# Altium integrated library PCB_Project.IntLib: 146 symbols (part 2 of 2)
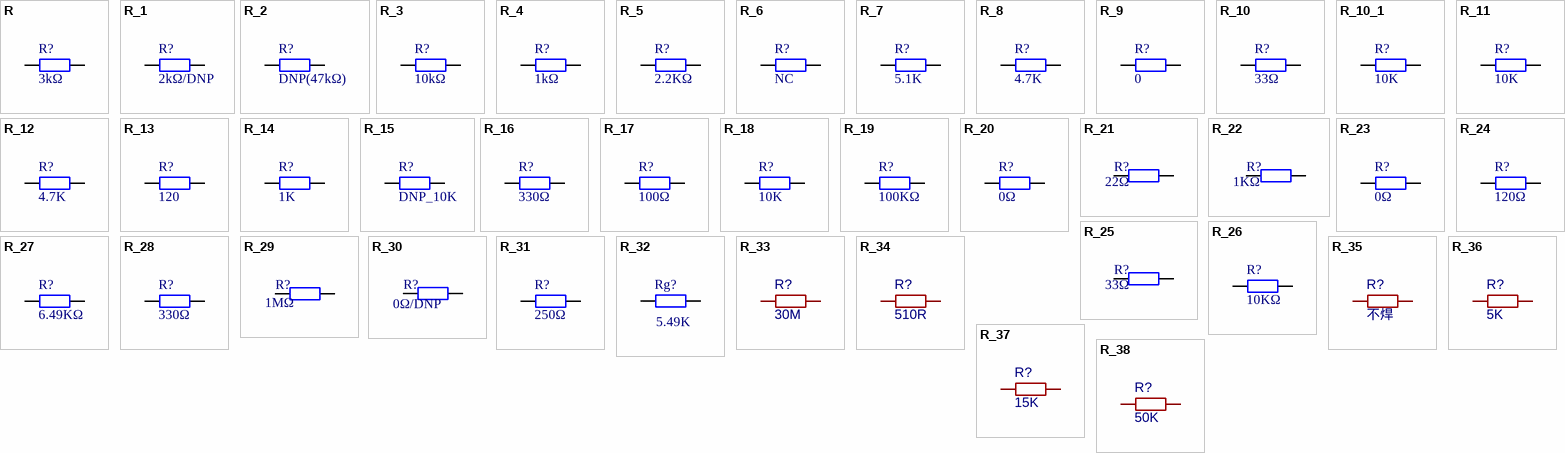
[diagram p4: symbols R to R_38]

## R_34
designator R?, comment 510R
贴片电阻; Device: R; 版权归属: 来自淘宝 ID：黄晶宝石; 封装库来自淘宝卖家 ID：黄晶宝石: 其他店铺购入均为盗版，不享受售后技术支持服务，请立即申请退款; Origin Footprint: R 0201_L; OriginFootprint 2: R 0402_L; OriginFootprint 3: R 0805_L; OriginFootprint 4: R 1206_L; OriginFootprint 5: R 1210_L; OriginFootprint 6: R 1812_L; OriginFootprint 7: R 2010_L; OriginFootprint 8: R 2512_L; OriginFootprint 9: R 0201_M; OriginFootprint 10: R 0402_M; OriginFootprint 11: R 0603_M; OriginFootprint 12: R 0805_M; OriginFootprint 13: R 1206_M; OriginFootprint 14: R 1210_M; OriginFootprint 15: R 1812_M; OriginFootprint 16: R 2010_M; OriginFootprint 17: R 2512_M; UniqueId: 7c41b6516f1c60a6; AddInBom: yes; OriginModelName: R 0603; BOM名称: 贴片电阻; 联系售后: https://shop463601444.taobao.com; DesignItemID: R; LibraryName: 0.1 - 电阻-电容-电感; SymbolName: R; FootprintName: R 0603_L
footprint 0603R
pins: 1, 2

## R_35
designator R?, comment 不焊
贴片电阻; Device: R; 版权归属: 来自淘宝 ID：黄晶宝石; 封装库来自淘宝卖家 ID：黄晶宝石: 其他店铺购入均为盗版，不享受售后技术支持服务，请立即申请退款; Origin Footprint: R 0201_L; OriginFootprint 2: R 0402_L; OriginFootprint 3: R 0805_L; OriginFootprint 4: R 1206_L; OriginFootprint 5: R 1210_L; OriginFootprint 6: R 1812_L; OriginFootprint 7: R 2010_L; OriginFootprint 8: R 2512_L; OriginFootprint 9: R 0201_M; OriginFootprint 10: R 0402_M; OriginFootprint 11: R 0603_M; OriginFootprint 12: R 0805_M; OriginFootprint 13: R 1206_M; OriginFootprint 14: R 1210_M; OriginFootprint 15: R 1812_M; OriginFootprint 16: R 2010_M; OriginFootprint 17: R 2512_M; UniqueId: 4df6a426e202bc68; AddInBom: yes; OriginModelName: R 0603; BOM名称: 贴片电阻; 联系售后: https://shop463601444.taobao.com; DesignItemID: R; LibraryName: 0.1 - 电阻-电容-电感; SymbolName: R; FootprintName: R 0603_L
footprint 0603R
pins: 1, 2

## R_36
designator R?, comment 5K
贴片电阻; Device: R; 版权归属: 来自淘宝 ID：黄晶宝石; 封装库来自淘宝卖家 ID：黄晶宝石: 其他店铺购入均为盗版，不享受售后技术支持服务，请立即申请退款; Origin Footprint: R 0201_L; OriginFootprint 2: R 0402_L; OriginFootprint 3: R 0805_L; OriginFootprint 4: R 1206_L; OriginFootprint 5: R 1210_L; OriginFootprint 6: R 1812_L; OriginFootprint 7: R 2010_L; OriginFootprint 8: R 2512_L; OriginFootprint 9: R 0201_M; OriginFootprint 10: R 0402_M; OriginFootprint 11: R 0603_M; OriginFootprint 12: R 0805_M; OriginFootprint 13: R 1206_M; OriginFootprint 14: R 1210_M; OriginFootprint 15: R 1812_M; OriginFootprint 16: R 2010_M; OriginFootprint 17: R 2512_M; UniqueId: df29ef2d077fcbbf; AddInBom: yes; OriginModelName: R 0603; BOM名称: 贴片电阻; 联系售后: https://shop463601444.taobao.com; DesignItemID: R; LibraryName: 0.1 - 电阻-电容-电感; SymbolName: R; FootprintName: R 0603_L
footprint 0603R
pins: 1, 2

## R_37
designator R?, comment 15K
贴片电阻; Device: R; 版权归属: 来自淘宝 ID：黄晶宝石; 封装库来自淘宝卖家 ID：黄晶宝石: 其他店铺购入均为盗版，不享受售后技术支持服务，请立即申请退款; Origin Footprint: R 0201_L; OriginFootprint 2: R 0402_L; OriginFootprint 3: R 0805_L; OriginFootprint 4: R 1206_L; OriginFootprint 5: R 1210_L; OriginFootprint 6: R 1812_L; OriginFootprint 7: R 2010_L; OriginFootprint 8: R 2512_L; OriginFootprint 9: R 0201_M; OriginFootprint 10: R 0402_M; OriginFootprint 11: R 0603_M; OriginFootprint 12: R 0805_M; OriginFootprint 13: R 1206_M; OriginFootprint 14: R 1210_M; OriginFootprint 15: R 1812_M; OriginFootprint 16: R 2010_M; OriginFootprint 17: R 2512_M; UniqueId: e41387fe6cfc9cb2; AddInBom: yes; OriginModelName: R 0603; BOM名称: 贴片电阻; 联系售后: https://shop463601444.taobao.com; DesignItemID: R; LibraryName: 0.1 - 电阻-电容-电感; SymbolName: R; FootprintName: R 0603_L
footprint 0603R
pins: 1, 2

## R_38
designator R?, comment 50K
贴片电阻; Device: R; 版权归属: 来自淘宝 ID：黄晶宝石; 封装库来自淘宝卖家 ID：黄晶宝石: 其他店铺购入均为盗版，不享受售后技术支持服务，请立即申请退款; Origin Footprint: R 0201_L; OriginFootprint 2: R 0402_L; OriginFootprint 3: R 0805_L; OriginFootprint 4: R 1206_L; OriginFootprint 5: R 1210_L; OriginFootprint 6: R 1812_L; OriginFootprint 7: R 2010_L; OriginFootprint 8: R 2512_L; OriginFootprint 9: R 0201_M; OriginFootprint 10: R 0402_M; OriginFootprint 11: R 0603_M; OriginFootprint 12: R 0805_M; OriginFootprint 13: R 1206_M; OriginFootprint 14: R 1210_M; OriginFootprint 15: R 1812_M; OriginFootprint 16: R 2010_M; OriginFootprint 17: R 2512_M; UniqueId: e7f646629e87fbc8; AddInBom: yes; OriginModelName: R 0603; BOM名称: 贴片电阻; 联系售后: https://shop463601444.taobao.com; DesignItemID: R; LibraryName: 0.1 - 电阻-电容-电感; SymbolName: R; FootprintName: R 0603_L
footprint 0603R
pins: 1, 2

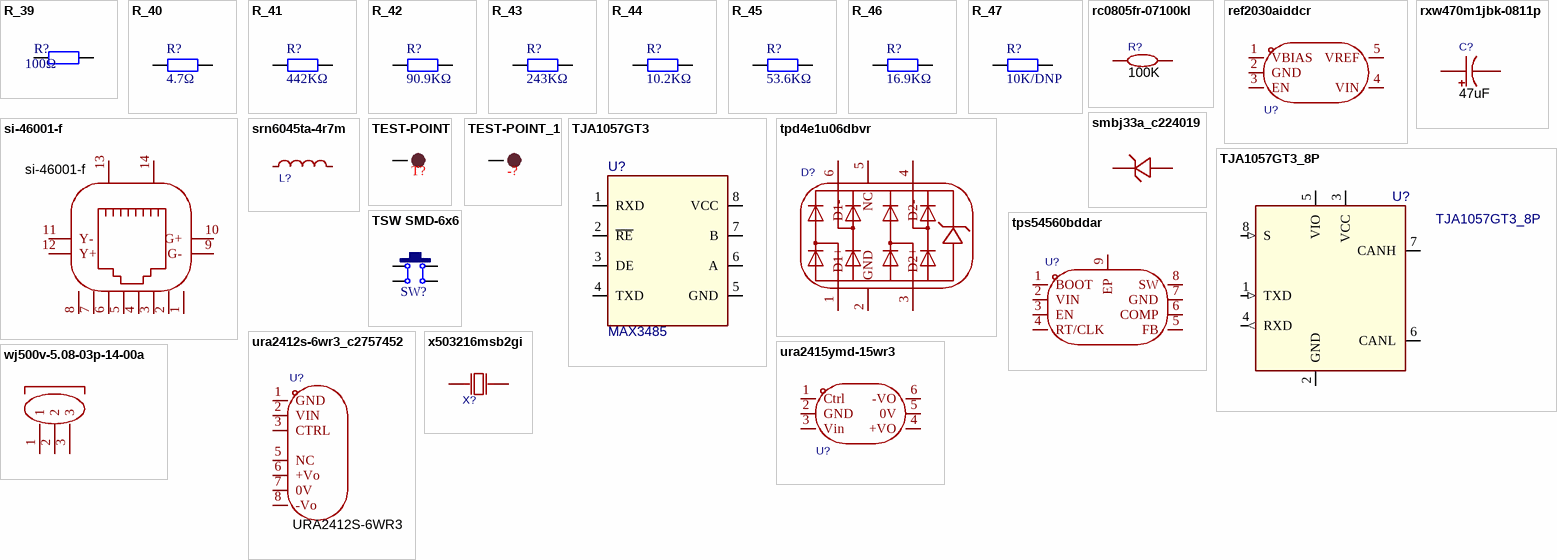
[diagram p3: symbols R_39 to x503216msb2gi]

## R_39
designator R?, comment 100Ω
贴片电阻; 版权归属: 来自淘宝 ID：黄晶宝石; 封装库来自淘宝卖家 ID：黄晶宝石: 其他店铺购入均为盗版，不享受售后技术支持服务，请立即申请退款; BOM名称: 贴片电阻; 联系售后: https://shop463601444.taobao.com
footprint 0603R
pins: 1, 2

## R_40
designator R?, comment 4.7Ω
贴片电阻; 版权归属: 来自淘宝 ID：黄晶宝石; 封装库来自淘宝卖家 ID：黄晶宝石: 其他店铺购入均为盗版，不享受售后技术支持服务，请立即申请退款; BOM名称: 贴片电阻; 联系售后: https://shop463601444.taobao.com
footprint 0603R
pins: 1, 2

## R_41
designator R?, comment 442KΩ
贴片电阻; 版权归属: 来自淘宝 ID：黄晶宝石; 封装库来自淘宝卖家 ID：黄晶宝石: 其他店铺购入均为盗版，不享受售后技术支持服务，请立即申请退款; BOM名称: 贴片电阻; 联系售后: https://shop463601444.taobao.com
footprint 0603R
pins: 1, 2

## R_42
designator R?, comment 90.9KΩ
贴片电阻; 版权归属: 来自淘宝 ID：黄晶宝石; 封装库来自淘宝卖家 ID：黄晶宝石: 其他店铺购入均为盗版，不享受售后技术支持服务，请立即申请退款; BOM名称: 贴片电阻; 联系售后: https://shop463601444.taobao.com
footprint 0603R
pins: 1, 2

## R_43
designator R?, comment 243KΩ
贴片电阻; 版权归属: 来自淘宝 ID：黄晶宝石; 封装库来自淘宝卖家 ID：黄晶宝石: 其他店铺购入均为盗版，不享受售后技术支持服务，请立即申请退款; BOM名称: 贴片电阻; 联系售后: https://shop463601444.taobao.com
footprint 0603R
pins: 1, 2

## R_44
designator R?, comment 10.2KΩ
贴片电阻; 版权归属: 来自淘宝 ID：黄晶宝石; 封装库来自淘宝卖家 ID：黄晶宝石: 其他店铺购入均为盗版，不享受售后技术支持服务，请立即申请退款; BOM名称: 贴片电阻; 联系售后: https://shop463601444.taobao.com
footprint 0603R
pins: 1, 2

## R_45
designator R?, comment 53.6KΩ
贴片电阻; 版权归属: 来自淘宝 ID：黄晶宝石; 封装库来自淘宝卖家 ID：黄晶宝石: 其他店铺购入均为盗版，不享受售后技术支持服务，请立即申请退款; BOM名称: 贴片电阻; 联系售后: https://shop463601444.taobao.com
footprint 0603R
pins: 1, 2

## R_46
designator R?, comment 16.9KΩ
贴片电阻; 版权归属: 来自淘宝 ID：黄晶宝石; 封装库来自淘宝卖家 ID：黄晶宝石: 其他店铺购入均为盗版，不享受售后技术支持服务，请立即申请退款; BOM名称: 贴片电阻; 联系售后: https://shop463601444.taobao.com
footprint 0603R
pins: 1, 2

## R_47
designator R?, comment 10K/DNP
贴片电阻; 版权归属: 来自淘宝 ID：黄晶宝石; 封装库来自淘宝卖家 ID：黄晶宝石: 其他店铺购入均为盗版，不享受售后技术支持服务，请立即申请退款; BOM名称: 贴片电阻; 联系售后: https://shop463601444.taobao.com
footprint 0603R
pins: 1, 2

## rc0805fr-07100kl
designator R?, comment 100K
电阻类型:厚膜电阻;阻值:100kΩ;精度:±1%;功率:125mW;工作电压:150V;温度系数:±100ppm/℃;; Manufacturer: YAGEO(国巨); Symbol: RC0805FR-07100KL; AddInBom: yes; ModelId: 37a81e68749a4138bd2dfa6897b24b85; ModelName: R0805_L2.0-W1.3-H0.6; ModelTransform: 78.74,51.181,0,0,0,0,0,-0.0005,0; Value: 100kΩ; Tolerance: ±1%; Power(Watts): 125mW; Voltage-Supply(Max): 150V; LCSC Part Name: 厚膜电阻 100kΩ ±1% 125mW; SupplierPart: C96346; ManufacturerPart: RC0805FR-07100KL; Supplier Footprint: 0805; JLCPCB Part Class: Extended Part; Datasheet: https://item.szlcsc.com/datasheet/RC0805FR-07100KL/97550.html; Supplier: LCSC; ConvertToPcb: yes; FootprintName: R0805_NEW; Type: 厚膜电阻; Temperature Coefficient: ±100ppm/℃; Operating Temperature: -55℃~+155℃
footprint R0805_NEW
pins: 1, 2

## ref2030aiddcr
designator U?  (value not drawn)
输出类型:固定;工作电压:3.02V~5.5V;输出电压:3V;输出电流:20mA;精度:±0.05%;; Manufacturer: TI(德州仪器); AddInBom: yes; ModelId: 018c57e721114987ae90467fe9f1d259; ModelName: SOT-23-5_L2.9-W1.6-P0.95-LS2.8-BL; ModelTransform: 114.96,110.236,0,0,0,0,0,0,0; Output Type: 固定; Output Voltage: 3V; Output Current: 20mA; Tolerance: ±0.05%; Temperature Coefficient: 8ppm/℃; Reference Type: 串联; Quiescent Current: 460uA; Noise - 1/10Hz to 10Hz: 12ppmp-p; Symbol: REF2030AIDDCR; LCSC Part Name: 3.02V~5.5V 串联 460uA 8ppm/℃; SupplierPart: C528704; ManufacturerPart: REF2030AIDDCR; Supplier Footprint: SOT-23-5; JLCPCB Part Class: Extended Part; Datasheet: https://www.ti.com/cn/lit/ds/symlink/ref2030.pdf; Supplier: LCSC; ConvertToPcb: yes; FootprintName: SOT-23-5_L2.9-W1.6-P0.95-LS2.8-BL; Voltage - Supply: 3.02V~5.5V; Minimum Cathode Current for Regulation: -; Noise - 10Hz to 10kHz: -; Operating Temperature: -40℃~+125℃; Features: 使能/关断；内置输出缓冲；多路参考输出
footprint SOT-23-5_L2.9-W1.6-P0.95-LS2.8-BL
pins: 1 VBIAS, 2 GND, 3 EN, 4 VIN, 5 VREF

## rxw470m1jbk-0811p
designator C?, comment 47uF
容值:47uF;精度:±20%;额定电压:63V;纹波电流:405mA@100kHz;等效串联电阻(ESR):342mΩ@100kHz;; Manufacturer: Lelon(立隆); Symbol: RXW470M1JBK-0811P; AddInBom: yes; ModelId: a2c936ec27754f809f3966430e36f767; ModelName: CAP-TH_D8.0-H8.0-P3.50; ModelTransform: 314.96,314.862,0,180,0,0,0,0,-137.795; Tolerance: ±20%; Voltage Rating: 63V; Pin Spacing: 3.5mm; Lifetime: 5000hrs@105℃; LCSC Part Name: 47uF ±20% 63V; SupplierPart: C134656; ManufacturerPart: RXW470M1JBK-0811P; Supplier Footprint: 插件,D8xL11.5mm; JLCPCB Part Class: Extended Part; Datasheet: https://item.szlcsc.com/datasheet/RXW470M1JBK-0811P/145966.html; Supplier: LCSC; ConvertToPcb: yes; FootprintName: CAP-TH_BD8.0-P3.50-D0.6-FD; Value: 47uF; Ripple Current: 405mA@100kHz; Equivalent Series Resistance(ESR): 342mΩ@100kHz; Diameter: 8mm; Height - Seated (Max): 11.5mm
footprint CAP-TH_BD8.0-P3.50-D0.6-FD
pins: 1, 2

## si-46001-f
designator RJ?
连接器类型:RJ45插座;安装方式:弯插;端口数量:2;LED:带LED;屏蔽:有屏蔽;触头镀层:金;工作温度:0℃~+70℃;; Manufacturer: belfuse; AddInBom: yes; ModelId: 7e7265f4ce6d4878958776467abf3fc9; ModelName: RJ45-TH_BELFUSE_SI-46001-F; ModelTransform: 639.999,670.39236,0,0,0,0,0,-25.079,-157.48; Connector Type: RJ45插座; Number of Ports: 2; LED: 带LED; Shielding: 有屏蔽; PoE: 不带PoE; Symbol: SI-46001-F; LCSC Part Name: 弯插 带LED; SupplierPart: C19267755; ManufacturerPart: SI-46001-F; Supplier Footprint: RJ45-TH; JLCPCB Part Class: Extended Part; Datasheet: https://item.szlcsc.com/datasheet/SI-46001-F/20524665.html; Supplier: LCSC; ConvertToPcb: yes; FootprintName: RJ45-TH_BELFUSE_SI-46001-F; Mounting Type: 弯插; Contact Plating: 金; Operating Temperature: 0℃~+70℃
footprint RJ45-TH_BELFUSE_SI-46001-F
pins: 1, 2, 3, 4, 5, 6, 7, 8, 9 G-, 10 G+, 11 Y-, 12 Y+, 13 SHELL, 14 SHELL

## smbj33a_c224019
designator D?  (value not drawn)
极性:单向;反向截止电压(Vrwm):33V;钳位电压:53.3V;峰值脉冲电流(Ipp):11.3A@10/1000us;峰值脉冲功率(Ppp):600W@10/1000us;击穿电压:40.6V;; Manufacturer: Littelfuse(美国力特); AddInBom: yes; ModelId: 5e8926c661484ff2a35b83e5ae62aeb9; ModelName: SMB_L4.6-W3.6-LS5.3-RD; ModelTransform: 212.598,141.732,0,0,0,0,0,0,0; Polarity: 单向; Reverse Stand-Off Voltage (Vrwm): 33V; Clamping Voltage: 53.3V; Voltage - Breakdown: 40.6V; Reverse Leakage Current (Ir): 1uA; level of protection: IEC 61000-4-4；IEC 61000-4-2; Type: TVS; Symbol: SMBJ33A_C224019; LCSC Part Name: SMBJ33A; SupplierPart: C224019; ManufacturerPart: SMBJ33A; Supplier Footprint: SMB(DO-214AA); JLCPCB Part Class: Extended Part; Datasheet: https://item.szlcsc.com/datasheet/SMBJ33A/224167.html; Supplier: LCSC; ConvertToPcb: yes; FootprintName: SMB_L4.6-W3.6-LS5.3-RD; Peak Pulse Current (Ipp): 11.3A@10/1000us; Peak Pulse Power Dissipation (Ppp): 600W@10/1000us; Operating Temperature: -65℃~+150℃
footprint SMB_L4.6-W3.6-LS5.3-RD
pins: 1 C, 2 A

## srn6045ta-4r7m
designator L?  (value not drawn)
电感值:4.7uH;精度:±20%;额定电流:4.5A;饱和电流(Isat):6.8A;类型:-;; Manufacturer: BOURNS; AddInBom: yes; ModelId: 30081a2752cd45e4871fd4480d5f295c; ModelName: IND-SMD_L6.0-W6.0-H4.5; ModelTransform: 236.22,237.007,0,90,0,0,-0.005,0,0; Value: 4.7uH; Tolerance: ±20%; Current Rating: 4.5A; Current - Saturation(Isat): 6.8A; DC Resistance(DCR): 26mΩ; Symbol: SRN6045TA-4R7M; LCSC Part Name: 4.7uH ±20% 6.8A; SupplierPart: C2044594; ManufacturerPart: SRN6045TA-4R7M; Supplier Footprint: SMD,6x6mm; JLCPCB Part Class: Extended Part; Datasheet: https://item.szlcsc.com/datasheet/SRN6045TA-4R7M/2136160.html; Supplier: LCSC; ConvertToPcb: yes; FootprintName: IND-SMD_L6.0-W6.0; Type: -
footprint IND-SMD_L6.0-W6.0
pins: 1, 2

## TEST-POINT
designator T?, comment TEST POINT  (value not drawn)
测试点
footprint TEST
pins: 1

## TEST-POINT_1
designator -?, comment TEST POINT  (value not drawn)
测试点
footprint TEST
pins: 1

## TJA1057GT3
designator U?, comment MAX3485
CLASS: IC
footprint SOIC-8
pins: 1 RXD, 2 ~{RE}, 3 DE, 4 TXD, 5 GND, 6 A, 7 B, 8 VCC

## TJA1057GT3_8P
designator U?
CLASS: IC
footprint SOIC-8
pins: 1 TXD (in), 2 GND (power), 3 VCC (power), 4 RXD (out), 5 VIO (power), 6 CANL (io), 7 CANH (io), 8 S (in)

## tpd4e1u06dbvr
designator D?  (value not drawn)
极性:单向;反向截止电压(Vrwm):5.5V;钳位电压:15V;峰值脉冲电流(Ipp):3A@8/20us;峰值脉冲功率(Ppp):45W@8/20us;击穿电压:8.5V;; Manufacturer: TI(德州仪器); AddInBom: yes; ModelId: 18da8f6c14a34920b3e136b5c401a119; ModelName: SOT-23-6_L2.9-W1.6-H1.5-LS2.8-P0.95; ModelTransform: 110.73671,114.173,0,180,0,0,0.001,-0.003,0; Polarity: 单向; Reverse Stand-Off Voltage (Vrwm): 5.5V; Clamping Voltage: 15V; Voltage - Breakdown: 8.5V; Reverse Leakage Current (Ir): 10nA; Number of Channels: 四路; level of protection: IEC 61000-4-4；IEC 61000-4-5；IEC 61000-4-2; Type: TVS; Junction Capacitance: 0.8pF; Symbol: TPD4E1U06DBVR; LCSC Part Name: 单向ESD; SupplierPart: C124691; ManufacturerPart: TPD4E1U06DBVR; Supplier Footprint: SOT-23-6; JLCPCB Part Class: Extended Part; Datasheet: https://www.ti.com/cn/lit/gpn/tpd4e1u06; Supplier: LCSC; ConvertToPcb: yes; FootprintName: SOT-23-6_L2.9-W1.6-P0.95-LS2.8-BR; Peak Pulse Current (Ipp): 3A@8/20us; Peak Pulse Power Dissipation (Ppp): 45W@8/20us; Operating Temperature: -40℃~+125℃
footprint SOT-23-6_L2.9-W1.6-P0.95-LS2.8-BR
pins: 1 D1+, 2 GND, 3 D2+, 4 D2-, 5 NC, 6 D1-

## tps54560bddar
designator U?  (value not drawn)
功能类型:降压型;工作电压:4.5V~60V;输出电压:800mV~58.8V;输出电流:5A;输出类型:可调;; Manufacturer: TI(德州仪器); AddInBom: yes; ModelId: 3be500d54979453db96888fa439d0a60; ModelName: POWERPAD-SO-8_L4.9-W3.9-P1.27-LS6.0-BL-EP; ModelTransform: 192.913,236.22,0,0,0,0,0,0,0; Function: 降压型; Output Current: 5A; Frequency - Switching: 500kHz; Synchronous Rectifier: 否; Number of Outputs: 1; Topology: 降压式; Quiescent Current: 146uA; Switch tube (built-in/external): 内置; Output Type: 可调; Symbol: TPS54560BDDAR; LCSC Part Name: 降压型 5A 4.5V~60V; SupplierPart: C1850354; ManufacturerPart: TPS54560BDDAR; Supplier Footprint: SO-8; JLCPCB Part Class: Extended Part; Datasheet: https://www.ti.com/cn/lit/gpn/tps54560b; Supplier: LCSC; ConvertToPcb: yes; FootprintName: POWERPAD-SO-8_L4.9-W3.9-P1.27-LS6.0-BL-EP; Voltage - Supply: 4.5V~60V; Output Voltage: 800mV~58.8V; Operating Temperature: -40℃~+150℃@(TJ); Features: 轻载高效模式；逐波限流；频率同步；过流保护
footprint POWERPAD-SO-8_L4.9-W3.9-P1.27-LS6.0-BL-EP
pins: 1 BOOT, 2 VIN, 3 EN, 4 RT/CLK, 5 FB, 6 COMP, 7 GND, 8 SW, 9 EP

## TSW SMD-6x6
designator SW?, comment SW_PB_ESW  (value not drawn)
SW2; BOM名称: 贴片6x6轻触开关; 版权归属: 封装库来自淘宝 ID：黄晶宝石; 唯一出售店铺网址: https://shop463601444.taobao.com
footprint TSW SMD-6*6*4.3 (6*6*4.3mm)
pins: 1, 2, 3, 4

## ura2412s-6wr3_c2757452
designator U?, comment URA2412S-6WR3
特性：超宽4:1输入电压范围。 高效率达85%。 空载功耗低至0.24W。 I/O隔离测试电压1.5kV DC。 输入欠压保护，输出短路、过流保护。 工作环境温度范围：-40℃至+85℃。应用：医疗保健。 工业控制; Manufacturer: MORNSUN(金升阳); Symbol: URA2412S-6WR3_C2757452; AddInBom: yes; ModelId: 59ee18447e164eb5803ce5c0826121e9; ModelName: PWRM-TH_URAXXXXS-6WR3; ModelTransform: 866.14,374.015,0,0,0,0,0,-81.299,-161.417; Number of Outputs: 2; Output Power: 6W; Voltage - Supply: 9V~36V; Conversion Efficiency: 83%; Output Voltage: ±12V; Output Current(Max): 250mA; Capacitive Load(Max): 120uF; Isolation Voltage(Vrms): 1.5kV; Value: 500kHz; Ripple Noise: 120mVp-p; LCSC Part Name: 9V~36V ±12V 250mA 6W; SupplierPart: C2757452; ManufacturerPart: URA2412S-6WR3; Supplier Footprint: SIP,22x9.5mm; JLCPCB Part Class: Extended Part; Datasheet: https://item.szlcsc.com/datasheet/URA2412S-6WR3/2873721.html; Supplier: LCSC; ConvertToPcb: yes; FootprintName: PWRM-TH_URAXXXXS-6WR3; Type: -; Features: 欠压保护；短路保护；过流保护；轻载高效模式; Operating Temperature: -40℃~+85℃; Quiescent Supply Current: -; Length: 22mm; Width: 9.5mm; Height: 12mm; Voltage Regulation: -
footprint PWRM-TH_URAXXXXS-6WR3
pins: 1 GND, 2 VIN, 3 CTRL, 5 NC, 6 +Vo, 7 0V, 8 -Vo

## ura2415ymd-15wr3
designator U?  (value not drawn)
特性：超宽4:1输入电压范围。高效率达90%。空载功耗低至0.24W。I/O隔离测试电压1.5kV DC。输入欠压保护、输出短路、过流、过压保护。工作环境温度范围：-40℃至+105℃。应用：工业控制。电力; Manufacturer: MORNSUN(金升阳); Symbol: URA2415YMD-15WR3_C5182197; AddInBom: yes; LCSC Part Name: 15W 隔离式 DC-DC 转换器; SupplierPart: C5182197; ManufacturerPart: URA2415YMD-15WR3; Supplier Footprint: DIP,25.4x25.4mm; JLCPCB Part Class: Extended Part; Datasheet: https://item.szlcsc.com/datasheet/URA2415YMD-15WR3/5842586.html; Supplier: LCSC; ConvertToPcb: yes; FootprintName: PWRM-TH_URA2415YMD-15WR3
footprint PWRM-TH_URA2415YMD-15WR3
pins: 1 Ctrl, 2 GND, 3 Vin, 4 +VO, 5 0V, 6 -VO

## wj500v-5.08-03p-14-00a
designator P?  (value not drawn)
结构:1x3P;间距:5.08mm;颜色:绿色;安装类型:直插;排数:1;每排PIN数:3;额定电流:18A;额定电压:250V;线规 - AWG:14~30;线规 - 平方毫米:2.5;工作温度:-40℃~+105℃;; Manufacturer: KANGNEX(康奈克斯电气); Symbol: WJ500V-5.08-3P-14-00A; AddInBom: yes; ModelId: f80d5090781743d49abcb05979f5618f; ModelName: CONN-TH_3P-P5.00_WJ500V-5.08-3P; ModelTransform: 623.621,393.7,0,0,0,0,11.811,-20.315,-177.165; Number of Positions or Pins: 1x3P; Pitch: 5.08mm; Number of PINs Per Row: 3; Screw Specification: M2.5; Current Rating: 18A; Voltage Rating (Max): 250V; Wire Gauge - AWG: 14~30; Wire Gauge - mm2: 2.5; LCSC Part Name: 1x3P 5.08mm 直插 排数:1 每排P数:3; SupplierPart: C72334; ManufacturerPart: WJ500V-5.08-03P-14-00A; Supplier Footprint: 插件,P=5.08mm; JLCPCB Part Class: Extended Part; Datasheet: https://item.szlcsc.com/datasheet/WJ500V-5.08-03P-14-00A/73443.html; Supplier: LCSC; ConvertToPcb: yes; FootprintName: CONN-TH_3P-P5.00_WJ500V-5.08-3P; Color: 绿色; Mounting Type: 直插; Number of Pins: 3P; Number of Rows: 1; Operating Temperature: -40℃~+105℃; Height Above Board: 14.07mm
footprint CONN-TH_3P-P5.00_WJ500V-5.08-3P
pins: 1, 2, 3

## x503216msb2gi
designator X?  (value not drawn)
晶振类型:贴片晶振;频率:16MHz;常温频差:±10ppm;负载电容:20pF;频率稳定度:±20ppm;; Manufacturer: YXC(扬兴晶振); AddInBom: yes; ModelId: 36c8b961b9064b60a7c920ab5154e867; ModelName: OSC-SMD_L5.0-W3.2-H1.4; ModelTransform: 196.85,126.023,0,0,0,0,0,0,0; Value: 16MHz; Normal temperature Frequency Tolerance: ±10ppm; Load Capacitance: 20pF; Frequency Stability: ±20ppm; Equivalent Series Resistance(ESR): 80Ω; Symbol: X503216MSB2GI; LCSC Part Name: YSX530GA 16MHZ 2P 5032 20PF ±10PPM -40~85℃ (±20PPM); SupplierPart: C112572; ManufacturerPart: X503216MSB2GI; Supplier Footprint: SMD5032-2P; JLCPCB Part Class: Extended Part; Datasheet: https://item.szlcsc.com/datasheet/X503216MSB2GI/113805.html; Supplier: LCSC; ConvertToPcb: yes; FootprintName: OSC-SMD_L5.0-W3.2; Type: 贴片晶振; Operating Temperature: -40℃~+85℃
footprint OSC-SMD_L5.0-W3.2
pins: 1 OSC1, 2 OSC2